# Altium footprint library PcbLib1.PcbLib: 6 footprints
Each footprint in its own frame and in the unit in brackets; x right, y up, seen from the top. Pads: shape width x height; smd on the part's side, far side on the other; paste and mask are expansions set on the pad; w line width, h text height; cw(c..) or ccw(c..) is an arc to the next point about the centre after c.
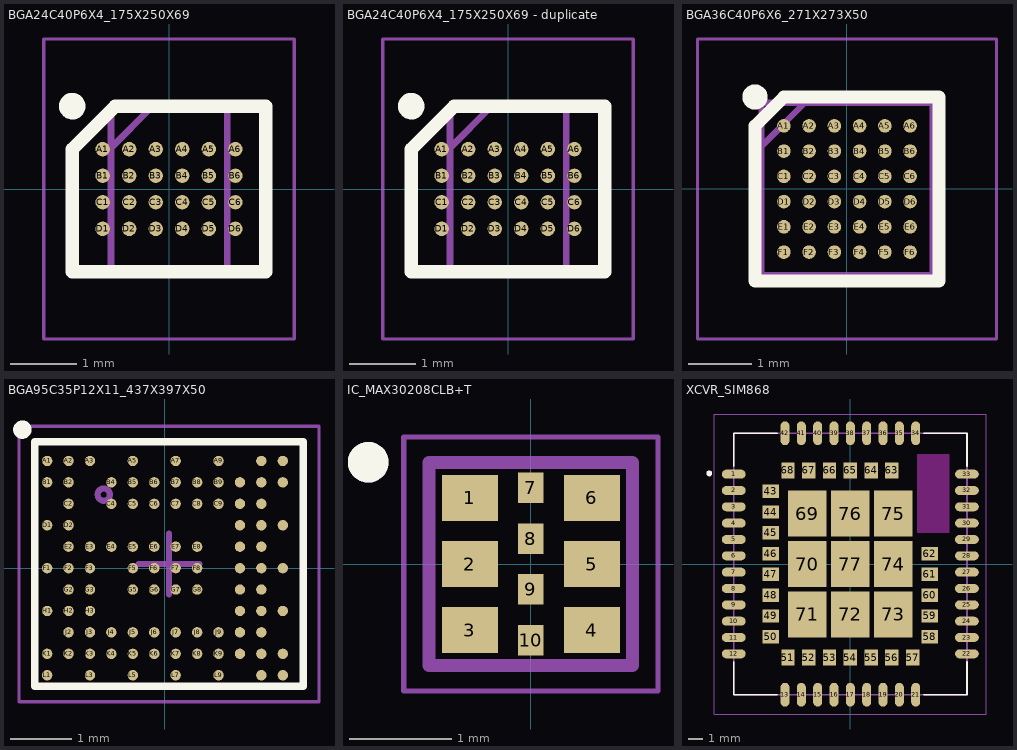
[diagram p0: the footprints below, top view; thin cyan lines are the x and y axes]

## BGA24C40P6X4_175X250X69 [mm]
pads (24):
  round 0.216 smd: A1(-1,0.6) A2(-0.6,0.6) A3(-0.2,0.6) A4(0.2,0.6) A5(0.6,0.6) A6(1,0.6) B1(-1,0.2) B2(-0.6,0.2) B3(-0.2,0.2) B4(0.2,0.2) B5(0.6,0.2) B6(1,0.2) C1(-1,-0.2) C2(-0.6,-0.2) C3(-0.2,-0.2) C4(0.2,-0.2) C5(0.6,-0.2) C6(1,-0.2) D1(-1,-0.6) D2(-0.6,-0.6) D3(-0.2,-0.6) D4(0.2,-0.6) D5(0.6,-0.6) D6(1,-0.6)
Top Overlay:
  circle w0.2: c-1.458,1.248 r0.1
  lines w0.2: -1.458,-1.247 -1.458,0.601 -0.81,1.249 1.458,1.248 1.458,-1.247 -1.458,-1.247
Mechanical 15:
  lines w0.1: -0.875,0.618 -0.245,1.248 ; -0.875,-1.247 -0.875,1.248 0.875,1.248 0.875,-1.247 -0.875,-1.247
Mechanical 20:
  lines w0.05: -1.888,-2.26 -1.888,2.26 1.887,2.26 1.887,-2.26 -1.888,-2.26

## BGA24C40P6X4_175X250X69 - duplicate [mm]
pads (24):
  round 0.216 smd: A1(-1,0.6) A2(-0.6,0.6) A3(-0.2,0.6) A4(0.2,0.6) A5(0.6,0.6) A6(1,0.6) B1(-1,0.2) B2(-0.6,0.2) B3(-0.2,0.2) B4(0.2,0.2) B5(0.6,0.2) B6(1,0.2) C1(-1,-0.2) C2(-0.6,-0.2) C3(-0.2,-0.2) C4(0.2,-0.2) C5(0.6,-0.2) C6(1,-0.2) D1(-1,-0.6) D2(-0.6,-0.6) D3(-0.2,-0.6) D4(0.2,-0.6) D5(0.6,-0.6) D6(1,-0.6)
Top Overlay:
  circle w0.2: c-1.458,1.248 r0.1
  lines w0.2: -1.458,-1.247 1.458,-1.247 1.458,1.248 -0.81,1.248 -1.458,0.601 -1.458,-1.247
Mechanical 15:
  lines w0.1: -0.875,0.618 -0.245,1.248 ; -0.875,-1.247 0.875,-1.247 0.875,1.248 -0.875,1.248 -0.875,-1.247
Mechanical 20:
  lines w0.05: -1.888,-2.26 1.887,-2.26 1.887,2.26 -1.888,2.26 -1.888,-2.26

## BGA36C40P6X6_271X273X50 [mm]
pads (36):
  round 0.216 smd: A1(-1,1) A2(-0.6,1) A3(-0.2,1) A4(0.2,1) A5(0.6,1) A6(1,1) B1(-1,0.6) B2(-0.6,0.6) B3(-0.2,0.6) B4(0.2,0.6) B5(0.6,0.6) B6(1,0.6) C1(-1,0.2) C2(-0.6,0.2) C3(-0.2,0.2) C4(0.2,0.2) C5(0.6,0.2) C6(1,0.2) D1(-1,-0.2) D2(-0.6,-0.2) D3(-0.2,-0.2) D4(0.2,-0.2) D5(0.6,-0.2) D6(1,-0.2) E1(-1,-0.6) E2(-0.6,-0.6) E3(-0.2,-0.6) E4(0.2,-0.6) E5(0.6,-0.6) E6(1,-0.6) F1(-1,-1) F2(-0.6,-1) F3(-0.2,-1) F4(0.2,-1) F5(0.6,-1) F6(1,-1)
Top Overlay:
  circle w0.2: c-1.458,1.458 r0.1
  lines w0.2: -1.458,-1.458 -1.458,1 -1,1.458 1.458,1.458 1.458,-1.458 -1.458,-1.458
Mechanical 15:
  lines w0.1: -1.354,0.676 -0.666,1.364 ; -1.354,-1.364 -1.354,1.364 1.354,1.364 1.354,-1.364 -1.354,-1.364
Mechanical 20:
  lines w0.05: -2.366,-2.377 -2.366,2.376 2.367,2.376 2.367,-2.377 -2.366,-2.377

## BGA95C35P12X11_437X397X50 [mm]
pads (95):
  round 0.17 smd mask+0.05: A1(-1.925,1.75) A2(-1.575,1.75) A3(-1.225,1.75) A5(-0.525,1.75) A7(0.175,1.75) A9(0.875,1.75) A11(1.575,1.75) A12(1.925,1.75) B1(-1.925,1.4) B2(-1.575,1.4) B4(-0.875,1.4) B5(-0.525,1.4) B6(-0.175,1.4) B7(0.175,1.4) B8(0.525,1.4) B9(0.875,1.4) B10(1.225,1.4) B11(1.575,1.4) B12(1.925,1.4) C2(-1.575,1.05) C4(-0.875,1.05) C5(-0.525,1.05) C6(-0.175,1.05) C7(0.175,1.05) C8(0.525,1.05) C9(0.875,1.05) C10(1.225,1.05) C11(1.575,1.05) D1(-1.925,0.7) D2(-1.575,0.7) D10(1.225,0.7) D11(1.575,0.7) D12(1.925,0.7) E2(-1.575,0.35) E3(-1.225,0.35) E4(-0.875,0.35) E5(-0.525,0.35) E6(-0.175,0.35) E7(0.175,0.35) E8(0.525,0.35) E10(1.225,0.35) E11(1.575,0.35) F1(-1.925,0) F2(-1.575,0) F3(-1.225,0) F5(-0.525,0) F6(-0.175,0) F7(0.175,0) F8(0.525,0) F10(1.225,0) F11(1.575,0) F12(1.925,0) G2(-1.575,-0.35) G3(-1.225,-0.35) G5(-0.525,-0.35) G6(-0.175,-0.35) G7(0.175,-0.35) G8(0.525,-0.35) G10(1.225,-0.35) G11(1.575,-0.35) H1(-1.925,-0.7) H2(-1.575,-0.7) H3(-1.225,-0.7) H10(1.225,-0.7) H11(1.575,-0.7) H12(1.925,-0.7) J2(-1.575,-1.05) J3(-1.225,-1.05) J4(-0.875,-1.05) J5(-0.525,-1.05) J6(-0.175,-1.05) J7(0.175,-1.05) J8(0.525,-1.05) J9(0.875,-1.05) J10(1.225,-1.05) J11(1.575,-1.05) K1(-1.925,-1.4) K2(-1.575,-1.4) K3(-1.225,-1.4) K4(-0.875,-1.4) K5(-0.525,-1.4) K6(-0.175,-1.4) K7(0.175,-1.4) K8(0.525,-1.4) K9(0.875,-1.4) K10(1.225,-1.4) K11(1.575,-1.4) K12(1.925,-1.4) L1(-1.925,-1.75) L3(-1.225,-1.75) L5(-0.525,-1.75) L7(0.175,-1.75) L9(0.875,-1.75) L11(1.575,-1.75) L12(1.925,-1.75)
Top Overlay:
  circle w0.2: c-2.329,2.262 r0.05
  lines w0.125: -2.129,-1.93 2.261,-1.93 2.261,2.064 -2.129,2.064 -2.129,-1.93
Mechanical 7:
  circle w0.1: c-1,1.2 r0.1
  lines w0.1: -2.129,-1.93 2.261,-1.93 2.261,2.064 -2.129,2.064 -2.129,-1.93
  text ".Designator" at -1.524,-0.102 h0.3
Mechanical 15:
  lines w0.05: -2.384,-2.183 -2.384,2.317 2.516,2.317 2.516,-2.183 -2.384,-2.183
  lines w0.1: -0.434,0.067 0.566,0.067 ; 0.066,-0.433 0.066,0.567
3D body "nRF5340-CLAA.sldprt": height 0.41, standoff -0.01, extent -2.129,-1.93 2.261,2.064

## IC_MAX30208CLB+T [mm]
height 0.85
pads (10):
  rect 0.55x0.45 smd: 1(-0.6,0.65) 2(-0.6,0) 3(-0.6,-0.65) 4(0.6,-0.65) 5(0.6,0) 6(0.6,0.65)
  rect 0.25x0.3 smd: 7(0,0.75) 8(0,0.25) 9(0,-0.25) 10(0,-0.75)
Top Overlay:
  circle w0.2: c-1.6,1 r0.1
Mechanical 13:
  circle w0.2: c-1.6,1 r0.1
  lines w0.127: -1,-1 1,-1 1,1 -1,1 -1,-1
Mechanical 15:
  lines w0.05: -1.25,-1.25 1.25,-1.25 1.25,1.25 -1.25,1.25 -1.25,-1.25

## XCVR_SIM868 [mm]
pads (77):
  oval 1.6x0.6 smd: 1(-7.85,6.05) 2(-7.85,4.95) 3(-7.85,3.85) 4(-7.85,2.75) 5(-7.85,1.65) 6(-7.85,0.55) 7(-7.85,-0.55) 8(-7.85,-1.65) 9(-7.85,-2.75) 10(-7.85,-3.85) 11(-7.85,-4.95) 12(-7.85,-6.05) 22(7.85,-6.05) 23(7.85,-4.95) 24(7.85,-3.85) 25(7.85,-2.75) 26(7.85,-1.65) 27(7.85,-0.55) 28(7.85,0.55) 29(7.85,1.65) 30(7.85,2.75) 31(7.85,3.85) 32(7.85,4.95) 33(7.85,6.05)
  oval 0.6x1.6 smd: 13(-4.4,-8.8) 14(-3.3,-8.8) 15(-2.2,-8.8) 16(-1.1,-8.8) 17(0,-8.8) 18(1.1,-8.8) 19(2.2,-8.8) 20(3.3,-8.8) 21(4.4,-8.8) 34(4.4,8.8) 35(3.3,8.8) 36(2.2,8.8) 37(1.1,8.8) 38(0,8.8) 39(-1.1,8.8) 40(-2.2,8.8) 41(-3.3,8.8) 42(-4.4,8.8)
  rect 1.1x0.9 smd paste-2: 43(-5.35,4.9) 44(-5.35,3.5) 45(-5.35,2.1) 46(-5.35,0.7) 47(-5.35,-0.7) 48(-5.35,-2.1) 49(-5.35,-3.5) 50(-5.35,-4.9) 58(5.35,-4.9) 59(5.35,-3.5) 60(5.35,-2.1) 61(5.35,-0.7) 62(5.35,0.7)
  rect 0.9x1.1 smd paste-2: 51(-4.2,-6.3) 52(-2.8,-6.3) 53(-1.4,-6.3) 54(0,-6.3) 55(1.4,-6.3) 56(2.8,-6.3) 57(4.2,-6.3) 63(2.8,6.3) 64(1.4,6.3) 65(0,6.3) 66(-1.4,6.3) 67(-2.8,6.3) 68(-4.2,6.3)
  rect 2.6x3.1 smd paste-3: 69(-2.9,3.4) 70(-2.9,0) 71(-2.9,-3.4) 72(0,-3.4) 73(2.9,-3.4) 74(2.9,0) 75(2.9,3.4) 76(0,3.4) 77(0,0)
Top Overlay:
  circle w0.2: c-9.5,6.1 r0.1
  lines w0.127: -7.85,-6.6 -7.85,-8.8 -4.95,-8.8 ; -7.85,6.6 -7.85,8.8 -4.95,8.8 ; 4.95,-8.8 7.85,-8.8 7.85,-6.6 ; 4.95,8.8 7.85,8.8 7.85,6.6
Top Paste:
  drawing of 140 lines, arcs and shapes, not listed
Keep-Out Layer:
  region: 6.65,2.102 4.504,2.102 4.504,7.4 6.65,7.4
  region: 6.65,2.101 4.502,2.101 4.502,7.4 6.65,7.4
Mechanical 13:
  lines w0.127: -7.85,-8.8 7.85,-8.8 7.85,8.8 -7.85,8.8 -7.85,-8.8
Mechanical 15:
  lines w0.05: -9.15,-10.1 9.15,-10.1 9.15,10.1 -9.15,10.1 -9.15,-10.1
3D body "step_temp.STEP": height 2.6, standoff 0, extent -7.85,-8.8 7.85,8.8